# Altium footprint library WR-TBL_Pluggable Connector_3.81mm.PcbLib: 201 footprints (part 6 of 13)
Each footprint in its own frame and in the unit in brackets; x right, y up, seen from the top. Pads: shape width x height; smd on the part's side, far side on the other; paste and mask are expansions set on the pad; w line width, h text height; cw(c..) or ccw(c..) is an arc to the next point about the centre after c.
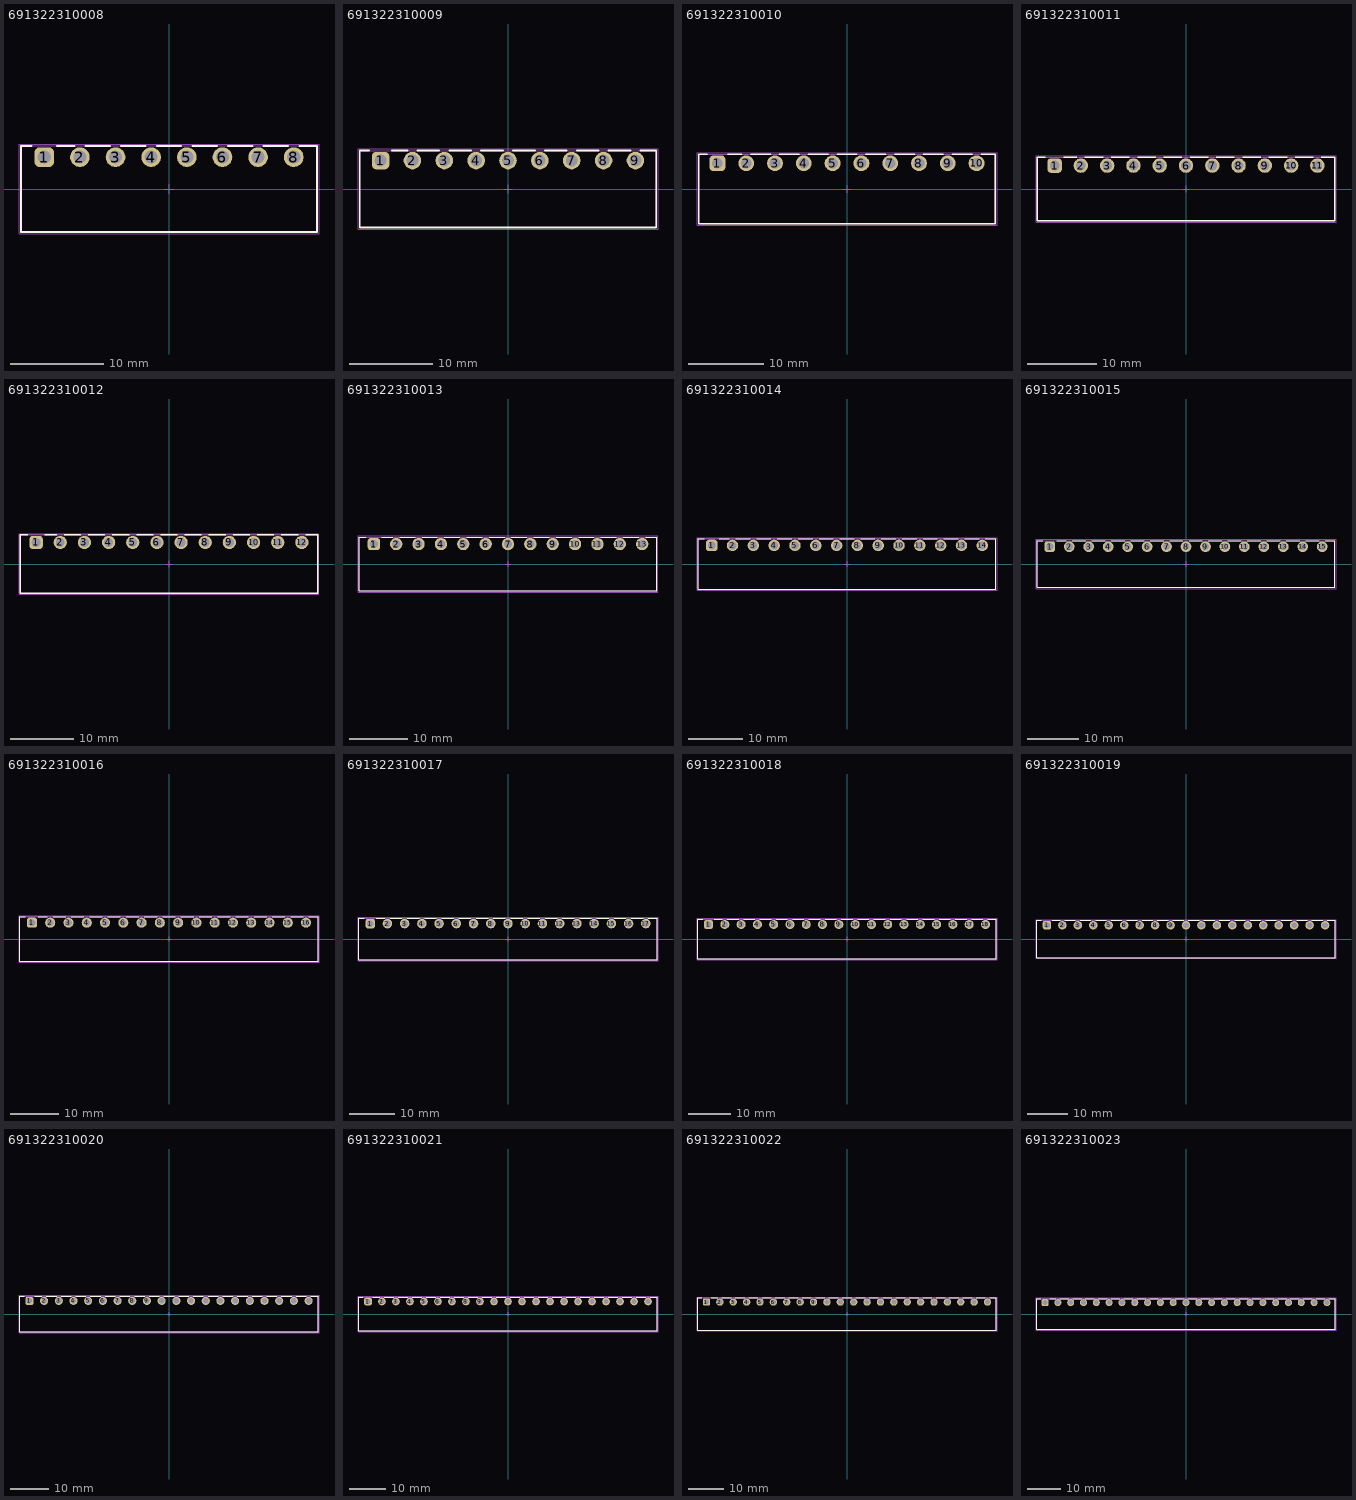
[diagram p5: the footprints below, top view; thin cyan lines are the x and y axes]

## 691322310008 [mm] "Horizontal PCB Header, pitch 3.81mm, 08p"
height 7
pads (8):
  rrect50% 2.1x2.1 hole 1.4: 1(-13.335,3.4)
  round 2.1 hole 1.4: 2(-9.525,3.4) 3(-5.715,3.4) 4(-1.905,3.4) 5(1.905,3.4) 6(5.715,3.4) 7(9.525,3.4) 8(13.335,3.4)
Top Overlay:
  lines w0.2: -14.685,4.6 -15.835,4.6 -15.835,-4.6 15.835,-4.6 15.835,4.6 13.925,4.6 ; -11.985,4.6 -10.115,4.6 ; -8.935,4.6 -6.305,4.6 ; -5.125,4.6 -2.495,4.6 ; -1.315,4.6 1.315,4.6 ; 2.495,4.6 5.125,4.6 ; 6.305,4.6 8.935,4.6 ; 10.115,4.6 12.745,4.6
Top Assembly:
  lines w0.1: -15.835,-4.6 -15.835,4.6 15.835,4.6 15.835,-4.6 -15.835,-4.6
Top Designator:
  text ".Designator" at -3.647,-0.357 h1
Top 3D Body:
  lines w0.1: -15.835,-4.6 15.835,-4.6 15.835,4.6 -15.835,4.6 -15.835,-4.6
Top Courtyard:
  lines w0.05: -16.035,-4.8 -16.035,4.8 16.035,4.8 16.035,-4.8 -16.035,-4.8
Top Component Center:
  lines w0.1: -0.5,0 0.5,0 ; 0,-0.5 0,0.5
3D body "691322310008.stp": height 7.25, standoff -3.45, extent -15.835,-4.6 15.835,4.6

## 691322310009 [mm] "Horizontal PCB Header, pitch 3.81mm, 09p"
height 7
pads (9):
  rrect50% 2.1x2.1 hole 1.4: 1(-15.24,3.4)
  round 2.1 hole 1.4: 2(-11.43,3.4) 3(-7.62,3.4) 4(-3.81,3.4) 5(0,3.4) 6(3.81,3.4) 7(7.62,3.4) 8(11.43,3.4) 9(15.24,3.4)
Top Overlay:
  lines w0.2: -16.59,4.6 -17.74,4.6 -17.74,-4.6 17.74,-4.6 17.74,4.6 15.83,4.6 ; -13.89,4.6 -12.02,4.6 ; -10.84,4.6 -8.21,4.6 ; -7.03,4.6 -4.4,4.6 ; -3.22,4.6 -0.59,4.6 ; 0.59,4.6 3.22,4.6 ; 4.4,4.6 7.03,4.6 ; 8.21,4.6 10.84,4.6 ; 12.02,4.6 14.65,4.6
Top Assembly:
  lines w0.1: -17.74,-4.6 -17.74,4.6 17.74,4.6 17.74,-4.6 -17.74,-4.6
Top Designator:
  text ".Designator" at -3.647,-0.357 h1
Top 3D Body:
  lines w0.1: -17.74,-4.6 17.74,-4.6 17.74,4.6 -17.74,4.6 -17.74,-4.6
Top Courtyard:
  lines w0.05: -17.94,-4.8 -17.94,4.8 17.94,4.8 17.94,-4.8 -17.94,-4.8
Top Component Center:
  lines w0.1: -0.5,0 0.5,0 ; 0,-0.5 0,0.5
3D body "691322310009.stp": height 7.25, standoff -3.45, extent -17.74,-4.6 17.74,4.6

## 691322310010 [mm] "Horizontal PCB Header, pitch 3.81mm, 10p"
height 7
pads (10):
  rrect50% 2.1x2.1 hole 1.4: 1(-17.145,3.4)
  round 2.1 hole 1.4: 2(-13.335,3.4) 3(-9.525,3.4) 4(-5.715,3.4) 5(-1.905,3.4) 6(1.905,3.4) 7(5.715,3.4) 8(9.525,3.4) 9(13.335,3.4) 10(17.145,3.4)
Top Overlay:
  lines w0.2: -18.495,4.6 -19.645,4.6 -19.645,-4.6 19.645,-4.6 19.645,4.6 17.735,4.6 ; -15.795,4.6 -13.925,4.6 ; -12.745,4.6 -10.115,4.6 ; -8.935,4.6 -6.305,4.6 ; -5.125,4.6 -2.495,4.6 ; -1.315,4.6 1.315,4.6 ; 2.495,4.6 5.125,4.6 ; 6.305,4.6 8.935,4.6 ; 10.115,4.6 12.745,4.6 ; 13.925,4.6 16.555,4.6
Top Assembly:
  lines w0.1: -19.645,-4.6 -19.645,4.6 19.645,4.6 19.645,-4.6 -19.645,-4.6
Top Designator:
  text ".Designator" at -3.647,-0.357 h1
Top 3D Body:
  lines w0.1: -19.645,-4.6 19.645,-4.6 19.645,4.6 -19.645,4.6 -19.645,-4.6
Top Courtyard:
  lines w0.05: -19.845,-4.8 -19.845,4.8 19.845,4.8 19.845,-4.8 -19.845,-4.8
Top Component Center:
  lines w0.1: -0.5,0 0.5,0 ; 0,-0.5 0,0.5
3D body "691322310010.stp": height 7.25, standoff -3.45, extent -19.645,-4.6 19.645,4.6

## 691322310011 [mm] "Horizontal PCB Header, pitch 3.81mm, 11p"
height 7
pads (11):
  rrect50% 2.1x2.1 hole 1.4: 1(-19.05,3.4)
  round 2.1 hole 1.4: 2(-15.24,3.4) 3(-11.43,3.4) 4(-7.62,3.4) 5(-3.81,3.4) 6(0,3.4) 7(3.81,3.4) 8(7.62,3.4) 9(11.43,3.4) 10(15.24,3.4) 11(19.05,3.4)
Top Overlay:
  lines w0.2: -20.4,4.6 -21.55,4.6 -21.55,-4.6 21.55,-4.6 21.55,4.6 19.64,4.6 ; -17.7,4.6 -15.83,4.6 ; -14.65,4.6 -12.02,4.6 ; -10.84,4.6 -8.21,4.6 ; -7.03,4.6 -4.4,4.6 ; -3.22,4.6 -0.59,4.6 ; 0.59,4.6 3.22,4.6 ; 4.4,4.6 7.03,4.6 ; 8.21,4.6 10.84,4.6 ; 12.02,4.6 14.65,4.6 ; 15.83,4.6 18.46,4.6
Top Assembly:
  lines w0.1: -21.55,-4.6 -21.55,4.6 21.55,4.6 21.55,-4.6 -21.55,-4.6
Top Designator:
  text ".Designator" at -3.647,-0.357 h1
Top 3D Body:
  lines w0.1: -21.55,-4.6 21.55,-4.6 21.55,4.6 -21.55,4.6 -21.55,-4.6
Top Courtyard:
  lines w0.05: -21.75,-4.8 -21.75,4.8 21.75,4.8 21.75,-4.8 -21.75,-4.8
Top Component Center:
  lines w0.1: -0.5,0 0.5,0 ; 0,-0.5 0,0.5
3D body "691322310011.stp": height 7.25, standoff -3.45, extent -21.55,-4.6 21.55,4.6

## 691322310012 [mm] "Horizontal PCB Header, pitch 3.81mm, 12p"
height 7
pads (12):
  rrect50% 2.1x2.1 hole 1.4: 1(-20.955,3.4)
  round 2.1 hole 1.4: 2(-17.145,3.4) 3(-13.335,3.4) 4(-9.525,3.4) 5(-5.715,3.4) 6(-1.905,3.4) 7(1.905,3.4) 8(5.715,3.4) 9(9.525,3.4) 10(13.335,3.4) 11(17.145,3.4) 12(20.955,3.4)
Top Overlay:
  lines w0.2: -22.305,4.6 -23.455,4.6 -23.455,-4.6 23.455,-4.6 23.455,4.6 21.545,4.6 ; -19.605,4.6 -17.735,4.6 ; -16.555,4.6 -13.925,4.6 ; -12.745,4.6 -10.115,4.6 ; -8.935,4.6 -6.305,4.6 ; -5.125,4.6 -2.495,4.6 ; -1.315,4.6 1.315,4.6 ; 2.495,4.6 5.125,4.6 ; 6.305,4.6 8.935,4.6 ; 10.115,4.6 12.745,4.6 ; 13.925,4.6 16.555,4.6 ; 17.735,4.6 20.365,4.6
Top Assembly:
  lines w0.1: -23.455,-4.6 -23.455,4.6 23.455,4.6 23.455,-4.6 -23.455,-4.6
Top Designator:
  text ".Designator" at -3.647,-0.357 h1
Top 3D Body:
  lines w0.1: -23.455,-4.6 23.455,-4.6 23.455,4.6 -23.455,4.6 -23.455,-4.6
Top Courtyard:
  lines w0.05: -23.655,-4.8 -23.655,4.8 23.655,4.8 23.655,-4.8 -23.655,-4.8
Top Component Center:
  lines w0.1: -0.5,0 0.5,0 ; 0,-0.5 0,0.5
3D body "691322310012.stp": height 7.25, standoff -3.45, extent -23.455,-4.6 23.455,4.6

## 691322310013 [mm] "Horizontal PCB Header, pitch 3.81mm, 13p"
height 7
pads (13):
  rrect50% 2.1x2.1 hole 1.4: 1(-22.86,3.4)
  round 2.1 hole 1.4: 2(-19.05,3.4) 3(-15.24,3.4) 4(-11.43,3.4) 5(-7.62,3.4) 6(-3.81,3.4) 7(0,3.4) 8(3.81,3.4) 9(7.62,3.4) 10(11.43,3.4) 11(15.24,3.4) 12(19.05,3.4) 13(22.86,3.4)
Top Overlay:
  lines w0.2: -24.21,4.6 -25.36,4.6 -25.36,-4.6 25.36,-4.6 25.36,4.6 23.45,4.6 ; -21.51,4.6 -19.64,4.6 ; -18.46,4.6 -15.83,4.6 ; -14.65,4.6 -12.02,4.6 ; -10.84,4.6 -8.21,4.6 ; -7.03,4.6 -4.4,4.6 ; -3.22,4.6 -0.59,4.6 ; 0.59,4.6 3.22,4.6 ; 4.4,4.6 7.03,4.6 ; 8.21,4.6 10.84,4.6 ; 12.02,4.6 14.65,4.6 ; 15.83,4.6 18.46,4.6 ; 19.64,4.6 22.27,4.6
Top Assembly:
  lines w0.1: -25.36,-4.6 25.36,-4.6 25.36,4.6 -25.36,4.6 -25.36,-4.6
Top Designator:
  text ".Designator" at -3.647,-0.357 h1
Top 3D Body:
  lines w0.1: -25.36,-4.6 -25.36,4.6 25.36,4.6 25.36,-4.6 -25.36,-4.6
Top Courtyard:
  lines w0.05: -25.56,-4.8 25.56,-4.8 25.56,4.8 -25.56,4.8 -25.56,-4.8
Top Component Center:
  lines w0.1: -0.5,0 0.5,0 ; 0,-0.5 0,0.5
3D body "691322310013.stp": height 7.25, standoff -3.45, extent -25.36,-4.6 25.36,4.6

## 691322310014 [mm] "Horizontal PCB Header, pitch 3.81mm, 14p"
height 7
pads (14):
  rrect50% 2.1x2.1 hole 1.4: 1(-24.765,3.4)
  round 2.1 hole 1.4: 2(-20.955,3.4) 3(-17.145,3.4) 4(-13.335,3.4) 5(-9.525,3.4) 6(-5.715,3.4) 7(-1.905,3.4) 8(1.905,3.4) 9(5.715,3.4) 10(9.525,3.4) 11(13.335,3.4) 12(17.145,3.4) 13(20.955,3.4) 14(24.765,3.4)
Top Overlay:
  lines w0.2: -26.115,4.6 -27.265,4.6 -27.265,-4.6 27.265,-4.6 27.265,4.6 25.355,4.6 ; -23.415,4.6 -21.545,4.6 ; -20.365,4.6 -17.735,4.6 ; -16.555,4.6 -13.925,4.6 ; -12.745,4.6 -10.115,4.6 ; -8.935,4.6 -6.305,4.6 ; -5.125,4.6 -2.495,4.6 ; -1.315,4.6 1.315,4.6 ; 2.495,4.6 5.125,4.6 ; 6.305,4.6 8.935,4.6 ; 10.115,4.6 12.745,4.6 ; 13.925,4.6 16.555,4.6 ; 17.735,4.6 20.365,4.6 ; 21.545,4.6 24.175,4.6
Top Assembly:
  lines w0.1: -27.265,-4.6 -27.265,4.6 27.265,4.6 27.265,-4.6 -27.265,-4.6
Top Designator:
  text ".Designator" at -3.647,-0.357 h1
Top 3D Body:
  lines w0.1: -27.265,-4.6 27.265,-4.6 27.265,4.6 -27.265,4.6 -27.265,-4.6
Top Courtyard:
  lines w0.05: -27.465,-4.8 -27.465,4.8 27.465,4.8 27.465,-4.8 -27.465,-4.8
Top Component Center:
  lines w0.1: -0.5,0 0.5,0 ; 0,-0.5 0,0.5
3D body "691322310014.stp": height 7.25, standoff -3.45, extent -27.265,-4.6 27.265,4.6

## 691322310015 [mm] "Horizontal PCB Header, pitch 3.81mm, 15p"
height 7
pads (15):
  rrect50% 2.1x2.1 hole 1.4: 1(-26.67,3.4)
  round 2.1 hole 1.4: 2(-22.86,3.4) 3(-19.05,3.4) 4(-15.24,3.4) 5(-11.43,3.4) 6(-7.62,3.4) 7(-3.81,3.4) 8(0,3.4) 9(3.81,3.4) 10(7.62,3.4) 11(11.43,3.4) 12(15.24,3.4) 13(19.05,3.4) 14(22.86,3.4) 15(26.67,3.4)
Top Overlay:
  lines w0.2: -28.02,4.6 -29.17,4.6 -29.17,-4.6 29.17,-4.6 29.17,4.6 27.26,4.6 ; -25.32,4.6 -23.45,4.6 ; -22.27,4.6 -19.64,4.6 ; -18.46,4.6 -15.83,4.6 ; -14.65,4.6 -12.02,4.6 ; -10.84,4.6 -8.21,4.6 ; -7.03,4.6 -4.4,4.6 ; -3.22,4.6 -0.59,4.6 ; 0.59,4.6 3.22,4.6 ; 4.4,4.6 7.03,4.6 ; 8.21,4.6 10.84,4.6 ; 12.02,4.6 14.65,4.6 ; 15.83,4.6 18.46,4.6 ; 19.64,4.6 22.27,4.6 ; 23.45,4.6 26.08,4.6
Top Assembly:
  lines w0.1: -29.17,-4.6 -29.17,4.6 29.17,4.6 29.17,-4.6 -29.17,-4.6
Top Designator:
  text ".Designator" at -3.647,-0.357 h1
Top 3D Body:
  lines w0.1: -29.17,-4.6 29.17,-4.6 29.17,4.6 -29.17,4.6 -29.17,-4.6
Top Courtyard:
  lines w0.05: -29.37,-4.8 -29.37,4.8 29.37,4.8 29.37,-4.8 -29.37,-4.8
Top Component Center:
  lines w0.1: -0.5,0 0.5,0 ; 0,-0.5 0,0.5
3D body "691322310015.stp": height 7.25, standoff -3.45, extent -29.17,-4.6 29.17,4.6

## 691322310016 [mm] "Horizontal PCB Header, pitch 3.81mm, 16p"
height 7
pads (16):
  rrect50% 2.1x2.1 hole 1.4: 1(-28.575,3.4)
  round 2.1 hole 1.4: 2(-24.765,3.4) 3(-20.955,3.4) 4(-17.145,3.4) 5(-13.335,3.4) 6(-9.525,3.4) 7(-5.715,3.4) 8(-1.905,3.4) 9(1.905,3.4) 10(5.715,3.4) 11(9.525,3.4) 12(13.335,3.4) 13(17.145,3.4) 14(20.955,3.4) 15(24.765,3.4) 16(28.575,3.4)
Top Overlay:
  lines w0.2: -29.925,4.6 -31.075,4.6 -31.075,-4.6 31.075,-4.6 31.075,4.6 29.165,4.6 ; -27.225,4.6 -25.355,4.6 ; -24.175,4.6 -21.545,4.6 ; -20.365,4.6 -17.735,4.6 ; -16.555,4.6 -13.925,4.6 ; -12.745,4.6 -10.115,4.6 ; -8.935,4.6 -6.305,4.6 ; -5.125,4.6 -2.495,4.6 ; -1.315,4.6 1.315,4.6 ; 2.495,4.6 5.125,4.6 ; 6.305,4.6 8.935,4.6 ; 10.115,4.6 12.745,4.6 ; 13.925,4.6 16.555,4.6 ; 17.735,4.6 20.365,4.6 ; 21.545,4.6 24.175,4.6 ; 25.355,4.6 27.985,4.6
Top Assembly:
  lines w0.1: -31.075,-4.6 31.075,-4.6 31.075,4.6 -31.075,4.6 -31.075,-4.6
Top Designator:
  text ".Designator" at -3.647,-0.357 h1
Top 3D Body:
  lines w0.1: -31.075,-4.6 -31.075,4.6 31.075,4.6 31.075,-4.6 -31.075,-4.6
Top Courtyard:
  lines w0.05: -31.275,-4.8 31.275,-4.8 31.275,4.8 -31.275,4.8 -31.275,-4.8
Top Component Center:
  lines w0.1: -0.5,0 0.5,0 ; 0,-0.5 0,0.5
3D body "691322310016.stp": height 7.25, standoff -3.45, extent -31.075,-4.6 31.075,4.6

## 691322310017 [mm] "Horizontal PCB Header, pitch 3.81mm, 17p"
height 7
pads (17):
  rrect50% 2.1x2.1 hole 1.4: 1(-30.48,3.4)
  round 2.1 hole 1.4: 2(-26.67,3.4) 3(-22.86,3.4) 4(-19.05,3.4) 5(-15.24,3.4) 6(-11.43,3.4) 7(-7.62,3.4) 8(-3.81,3.4) 9(0,3.4) 10(3.81,3.4) 11(7.62,3.4) 12(11.43,3.4) 13(15.24,3.4) 14(19.05,3.4) 15(22.86,3.4) 16(26.67,3.4) 17(30.48,3.4)
Top Overlay:
  lines w0.2: -31.83,4.6 -32.98,4.6 -32.98,-4.6 32.98,-4.6 32.98,4.6 31.07,4.6 ; -29.13,4.6 -27.26,4.6 ; -26.08,4.6 -23.45,4.6 ; -22.27,4.6 -19.64,4.6 ; -18.46,4.6 -15.83,4.6 ; -14.65,4.6 -12.02,4.6 ; -10.84,4.6 -8.21,4.6 ; -7.03,4.6 -4.4,4.6 ; -3.22,4.6 -0.59,4.6 ; 0.59,4.6 3.22,4.6 ; 4.4,4.6 7.03,4.6 ; 8.21,4.6 10.84,4.6 ; 12.02,4.6 14.65,4.6 ; 15.83,4.6 18.46,4.6 ; 19.64,4.6 22.27,4.6 ; 23.45,4.6 26.08,4.6 ; 27.26,4.6 29.89,4.6
Top Assembly:
  lines w0.1: -32.98,-4.6 -32.98,4.6 32.98,4.6 32.98,-4.6 -32.98,-4.6
Top Designator:
  text ".Designator" at -3.647,-0.357 h1
Top 3D Body:
  lines w0.1: -32.98,-4.6 32.98,-4.6 32.98,4.6 -32.98,4.6 -32.98,-4.6
Top Courtyard:
  lines w0.05: -33.18,-4.8 -33.18,4.8 33.18,4.8 33.18,-4.8 -33.18,-4.8
Top Component Center:
  lines w0.1: -0.5,0 0.5,0 ; 0,-0.5 0,0.5
3D body "691322310017.stp": height 7.25, standoff -3.45, extent -32.98,-4.6 32.98,4.6

## 691322310018 [mm] "Horizontal PCB Header, pitch 3.81mm, 18p"
height 7
pads (18):
  rrect50% 2.1x2.1 hole 1.4: 1(-32.385,3.4)
  round 2.1 hole 1.4: 2(-28.575,3.4) 3(-24.765,3.4) 4(-20.955,3.4) 5(-17.145,3.4) 6(-13.335,3.4) 7(-9.525,3.4) 8(-5.715,3.4) 9(-1.905,3.4) 10(1.905,3.4) 11(5.715,3.4) 12(9.525,3.4) 13(13.335,3.4) 14(17.145,3.4) 15(20.955,3.4) 16(24.765,3.4) 17(28.575,3.4) 18(32.385,3.4)
Top Overlay:
  lines w0.2: -33.735,4.6 -34.885,4.6 -34.885,-4.6 34.885,-4.6 34.885,4.6 32.975,4.6 ; -31.035,4.6 -29.165,4.6 ; -27.985,4.6 -25.355,4.6 ; -24.175,4.6 -21.545,4.6 ; -20.365,4.6 -17.735,4.6 ; -16.555,4.6 -13.925,4.6 ; -12.745,4.6 -10.115,4.6 ; -8.935,4.6 -6.305,4.6 ; -5.125,4.6 -2.495,4.6 ; -1.315,4.6 1.315,4.6 ; 2.495,4.6 5.125,4.6 ; 6.305,4.6 8.935,4.6 ; 10.115,4.6 12.745,4.6 ; 13.925,4.6 16.555,4.6 ; 17.735,4.6 20.365,4.6 ; 21.545,4.6 24.175,4.6 ; 25.355,4.6 27.985,4.6 ; 29.165,4.6 31.795,4.6
Top Assembly:
  lines w0.1: -34.885,-4.6 -34.885,4.6 34.885,4.6 34.885,-4.6 -34.885,-4.6
Top Designator:
  text ".Designator" at -3.647,-0.357 h1
Top 3D Body:
  lines w0.1: -34.885,-4.6 34.885,-4.6 34.885,4.6 -34.885,4.6 -34.885,-4.6
Top Courtyard:
  lines w0.05: -35.085,-4.8 -35.085,4.8 35.085,4.8 35.085,-4.8 -35.085,-4.8
Top Component Center:
  lines w0.1: -0.5,0 0.5,0 ; 0,-0.5 0,0.5
3D body "691322310018.stp": height 7.25, standoff -3.45, extent -34.885,-4.6 34.885,4.6

## 691322310019 [mm] "Horizontal PCB Header, pitch 3.81mm, 19p"
height 7
pads (19):
  rrect50% 2.1x2.1 hole 1.4: 1(-34.29,3.4)
  round 2.1 hole 1.4: 2(-30.48,3.4) 3(-26.67,3.4) 4(-22.86,3.4) 5(-19.05,3.4) 6(-15.24,3.4) 7(-11.43,3.4) 8(-7.62,3.4) 9(-3.81,3.4) 10(0,3.4) 11(3.81,3.4) 12(7.62,3.4) 13(11.43,3.4) 14(15.24,3.4) 15(19.05,3.4) 16(22.86,3.4) 17(26.67,3.4) 18(30.48,3.4) 19(34.29,3.4)
Top Overlay:
  lines w0.2: -35.64,4.6 -36.79,4.6 -36.79,-4.6 36.79,-4.6 36.79,4.6 34.88,4.6 ; -32.94,4.6 -31.07,4.6 ; -29.89,4.6 -27.26,4.6 ; -26.08,4.6 -23.45,4.6 ; -22.27,4.6 -19.64,4.6 ; -18.46,4.6 -15.83,4.6 ; -14.65,4.6 -12.02,4.6 ; -10.84,4.6 -8.21,4.6 ; -7.03,4.6 -4.4,4.6 ; -3.22,4.6 -0.59,4.6 ; 0.59,4.6 3.22,4.6 ; 4.4,4.6 7.03,4.6 ; 8.21,4.6 10.84,4.6 ; 12.02,4.6 14.65,4.6 ; 15.83,4.6 18.46,4.6 ; 19.64,4.6 22.27,4.6 ; 23.45,4.6 26.08,4.6 ; 27.26,4.6 29.89,4.6 ; 31.07,4.6 33.7,4.6
Top Assembly:
  lines w0.1: -36.79,-4.6 -36.79,4.6 36.79,4.6 36.79,-4.6 -36.79,-4.6
Top Designator:
  text ".Designator" at -3.647,-0.357 h1
Top 3D Body:
  lines w0.1: -36.79,-4.6 36.79,-4.6 36.79,4.6 -36.79,4.6 -36.79,-4.6
Top Courtyard:
  lines w0.05: -36.99,-4.8 -36.99,4.8 36.99,4.8 36.99,-4.8 -36.99,-4.8
Top Component Center:
  lines w0.1: -0.5,0 0.5,0 ; 0,-0.5 0,0.5
3D body "691322310019.stp": height 7.25, standoff -3.45, extent -36.79,-4.6 36.79,4.6

## 691322310020 [mm] "Horizontal PCB Header, pitch 3.81mm, 20p"
height 7
pads (20):
  rrect50% 2.1x2.1 hole 1.4: 1(-36.195,3.4)
  round 2.1 hole 1.4: 2(-32.385,3.4) 3(-28.575,3.4) 4(-24.765,3.4) 5(-20.955,3.4) 6(-17.145,3.4) 7(-13.335,3.4) 8(-9.525,3.4) 9(-5.715,3.4) 10(-1.905,3.4) 11(1.905,3.4) 12(5.715,3.4) 13(9.525,3.4) 14(13.335,3.4) 15(17.145,3.4) 16(20.955,3.4) 17(24.765,3.4) 18(28.575,3.4) 19(32.385,3.4) 20(36.195,3.4)
Top Overlay:
  lines w0.2: -37.545,4.6 -38.695,4.6 -38.695,-4.6 38.695,-4.6 38.695,4.6 36.785,4.6 ; -34.845,4.6 -32.975,4.6 ; -31.795,4.6 -29.165,4.6 ; -27.985,4.6 -25.355,4.6 ; -24.175,4.6 -21.545,4.6 ; -20.365,4.6 -17.735,4.6 ; -16.555,4.6 -13.925,4.6 ; -12.745,4.6 -10.115,4.6 ; -8.935,4.6 -6.305,4.6 ; -5.125,4.6 -2.495,4.6 ; -1.315,4.6 1.315,4.6 ; 2.495,4.6 5.125,4.6 ; 6.305,4.6 8.935,4.6 ; 10.115,4.6 12.745,4.6 ; 13.925,4.6 16.555,4.6 ; 17.735,4.6 20.365,4.6 ; 21.545,4.6 24.175,4.6 ; 25.355,4.6 27.985,4.6 ; 29.165,4.6 31.795,4.6 ; 32.975,4.6 35.605,4.6
Top Assembly:
  lines w0.1: -38.695,-4.6 38.695,-4.6 38.695,4.6 -38.695,4.6 -38.695,-4.6
Top Designator:
  text ".Designator" at -3.647,-0.357 h1
Top 3D Body:
  lines w0.1: -38.695,-4.6 -38.695,4.6 38.695,4.6 38.695,-4.6 -38.695,-4.6
Top Courtyard:
  lines w0.05: -38.895,-4.8 38.895,-4.8 38.895,4.8 -38.895,4.8 -38.895,-4.8
Top Component Center:
  lines w0.1: -0.5,0 0.5,0 ; 0,-0.5 0,0.5
3D body "691322310020.stp": height 7.25, standoff -3.45, extent -38.695,-4.6 38.695,4.6

## 691322310021 [mm] "Horizontal PCB Header, pitch 3.81mm, 21p"
height 7
pads (21):
  rrect50% 2.1x2.1 hole 1.4: 1(-38.1,3.4)
  round 2.1 hole 1.4: 2(-34.29,3.4) 3(-30.48,3.4) 4(-26.67,3.4) 5(-22.86,3.4) 6(-19.05,3.4) 7(-15.24,3.4) 8(-11.43,3.4) 9(-7.62,3.4) 10(-3.81,3.4) 11(0,3.4) 12(3.81,3.4) 13(7.62,3.4) 14(11.43,3.4) 15(15.24,3.4) 16(19.05,3.4) 17(22.86,3.4) 18(26.67,3.4) 19(30.48,3.4) 20(34.29,3.4) 21(38.1,3.4)
Top Overlay:
  lines w0.2: -39.45,4.6 -40.6,4.6 -40.6,-4.6 40.6,-4.6 40.6,4.6 38.69,4.6 ; -36.75,4.6 -34.88,4.6 ; -33.7,4.6 -31.07,4.6 ; -29.89,4.6 -27.26,4.6 ; -26.08,4.6 -23.45,4.6 ; -22.27,4.6 -19.64,4.6 ; -18.46,4.6 -15.83,4.6 ; -14.65,4.6 -12.02,4.6 ; -10.84,4.6 -8.21,4.6 ; -7.03,4.6 -4.4,4.6 ; -3.22,4.6 -0.59,4.6 ; 0.59,4.6 3.22,4.6 ; 4.4,4.6 7.03,4.6 ; 8.21,4.6 10.84,4.6 ; 12.02,4.6 14.65,4.6 ; 15.83,4.6 18.46,4.6 ; 19.64,4.6 22.27,4.6 ; 23.45,4.6 26.08,4.6 ; 27.26,4.6 29.89,4.6 ; 31.07,4.6 33.7,4.6 ; 34.88,4.6 37.51,4.6
Top Assembly:
  lines w0.1: -40.6,-4.6 40.6,-4.6 40.6,4.6 -40.6,4.6 -40.6,-4.6
Top Designator:
  text ".Designator" at -3.647,-0.357 h1
Top 3D Body:
  lines w0.1: -40.6,-4.6 -40.6,4.6 40.6,4.6 40.6,-4.6 -40.6,-4.6
Top Courtyard:
  lines w0.05: -40.8,-4.8 40.8,-4.8 40.8,4.8 -40.8,4.8 -40.8,-4.8
Top Component Center:
  lines w0.1: -0.5,0 0.5,0 ; 0,-0.5 0,0.5
3D body "691322310021.stp": height 7.25, standoff -3.45, extent -40.6,-4.6 40.6,4.6

## 691322310022 [mm] "Horizontal PCB Header, pitch 3.81mm, 22p"
height 7
pads (22):
  rrect50% 2.1x2.1 hole 1.4: 1(-40.005,3.4)
  round 2.1 hole 1.4: 2(-36.195,3.4) 3(-32.385,3.4) 4(-28.575,3.4) 5(-24.765,3.4) 6(-20.955,3.4) 7(-17.145,3.4) 8(-13.335,3.4) 9(-9.525,3.4) 10(-5.715,3.4) 11(-1.905,3.4) 12(1.905,3.4) 13(5.715,3.4) 14(9.525,3.4) 15(13.335,3.4) 16(17.145,3.4) 17(20.955,3.4) 18(24.765,3.4) 19(28.575,3.4) 20(32.385,3.4) 21(36.195,3.4) 22(40.005,3.4)
Top Overlay:
  lines w0.2: -41.355,4.6 -42.505,4.6 -42.505,-4.6 42.505,-4.6 42.505,4.6 40.595,4.6 ; -38.655,4.6 -36.785,4.6 ; -35.605,4.6 -32.975,4.6 ; -31.795,4.6 -29.165,4.6 ; -27.985,4.6 -25.355,4.6 ; -24.175,4.6 -21.545,4.6 ; -20.365,4.6 -17.735,4.6 ; -16.555,4.6 -13.925,4.6 ; -12.745,4.6 -10.115,4.6 ; -8.935,4.6 -6.305,4.6 ; -5.125,4.6 -2.495,4.6 ; -1.315,4.6 1.315,4.6 ; 2.495,4.6 5.125,4.6 ; 6.305,4.6 8.935,4.6 ; 10.115,4.6 12.745,4.6 ; 13.925,4.6 16.555,4.6 ; 17.735,4.6 20.365,4.6 ; 21.545,4.6 24.175,4.6 ; 25.355,4.6 27.985,4.6 ; 29.165,4.6 31.795,4.6 ; 32.975,4.6 35.605,4.6 ; 36.785,4.6 39.415,4.6
Top Assembly:
  lines w0.1: -42.505,-4.6 -42.505,4.6 42.505,4.6 42.505,-4.6 -42.505,-4.6
Top Designator:
  text ".Designator" at -3.647,-0.357 h1
Top 3D Body:
  lines w0.1: -42.505,-4.6 42.505,-4.6 42.505,4.6 -42.505,4.6 -42.505,-4.6
Top Courtyard:
  lines w0.05: -42.705,-4.8 -42.705,4.8 42.705,4.8 42.705,-4.8 -42.705,-4.8
Top Component Center:
  lines w0.1: -0.5,0 0.5,0 ; 0,-0.5 0,0.5
3D body "691322310022.stp": height 7.25, standoff -3.45, extent -42.505,-4.6 42.505,4.6

## 691322310023 [mm] "Horizontal PCB Header, pitch 3.81mm, 23p"
height 7
pads (23):
  rrect50% 2.1x2.1 hole 1.4: 1(-41.91,3.4)
  round 2.1 hole 1.4: 2(-38.1,3.4) 3(-34.29,3.4) 4(-30.48,3.4) 5(-26.67,3.4) 6(-22.86,3.4) 7(-19.05,3.4) 8(-15.24,3.4) 9(-11.43,3.4) 10(-7.62,3.4) 11(-3.81,3.4) 12(0,3.4) 13(3.81,3.4) 14(7.62,3.4) 15(11.43,3.4) 16(15.24,3.4) 17(19.05,3.4) 18(22.86,3.4) 19(26.67,3.4) 20(30.48,3.4) 21(34.29,3.4) 22(38.1,3.4) 23(41.91,3.4)
Top Overlay:
  lines w0.2: -43.26,4.6 -44.41,4.6 -44.41,-4.6 44.41,-4.6 44.41,4.6 42.5,4.6 ; -40.56,4.6 -38.69,4.6 ; -37.51,4.6 -34.88,4.6 ; -33.7,4.6 -31.07,4.6 ; -29.89,4.6 -27.26,4.6 ; -26.08,4.6 -23.45,4.6 ; -22.27,4.6 -19.64,4.6 ; -18.46,4.6 -15.83,4.6 ; -14.65,4.6 -12.02,4.6 ; -10.84,4.6 -8.21,4.6 ; -7.03,4.6 -4.4,4.6 ; -3.22,4.6 -0.59,4.6 ; 0.59,4.6 3.22,4.6 ; 4.4,4.6 7.03,4.6 ; 8.21,4.6 10.84,4.6 ; 12.02,4.6 14.65,4.6 ; 15.83,4.6 18.46,4.6 ; 19.64,4.6 22.27,4.6 ; 23.45,4.6 26.08,4.6 ; 27.26,4.6 29.89,4.6 ; 31.07,4.6 33.7,4.6 ; 34.88,4.6 37.51,4.6 ; 38.69,4.6 41.32,4.6
Top Assembly:
  lines w0.1: -44.41,-4.6 44.41,-4.6 44.41,4.6 -44.41,4.6 -44.41,-4.6
Top Designator:
  text ".Designator" at -3.647,-0.357 h1
Top 3D Body:
  lines w0.1: -44.41,-4.6 -44.41,4.6 44.41,4.6 44.41,-4.6 -44.41,-4.6
Top Courtyard:
  lines w0.05: -44.61,-4.8 44.61,-4.8 44.61,4.8 -44.61,4.8 -44.61,-4.8
Top Component Center:
  lines w0.1: -0.5,0 0.5,0 ; 0,-0.5 0,0.5
3D body "691322310023.stp": height 7.25, standoff -3.45, extent -44.41,-4.6 44.41,4.6